# Altium footprint library AudioMoth 1.1.PCBLIB: 193 footprints (part 12 of 13)
Each footprint in its own frame and in the unit in brackets; x right, y up, seen from the top. Pads: shape width x height; smd on the part's side, far side on the other; paste and mask are expansions set on the pad; w line width, h text height; cw(c..) or ccw(c..) is an arc to the next point about the centre after c.
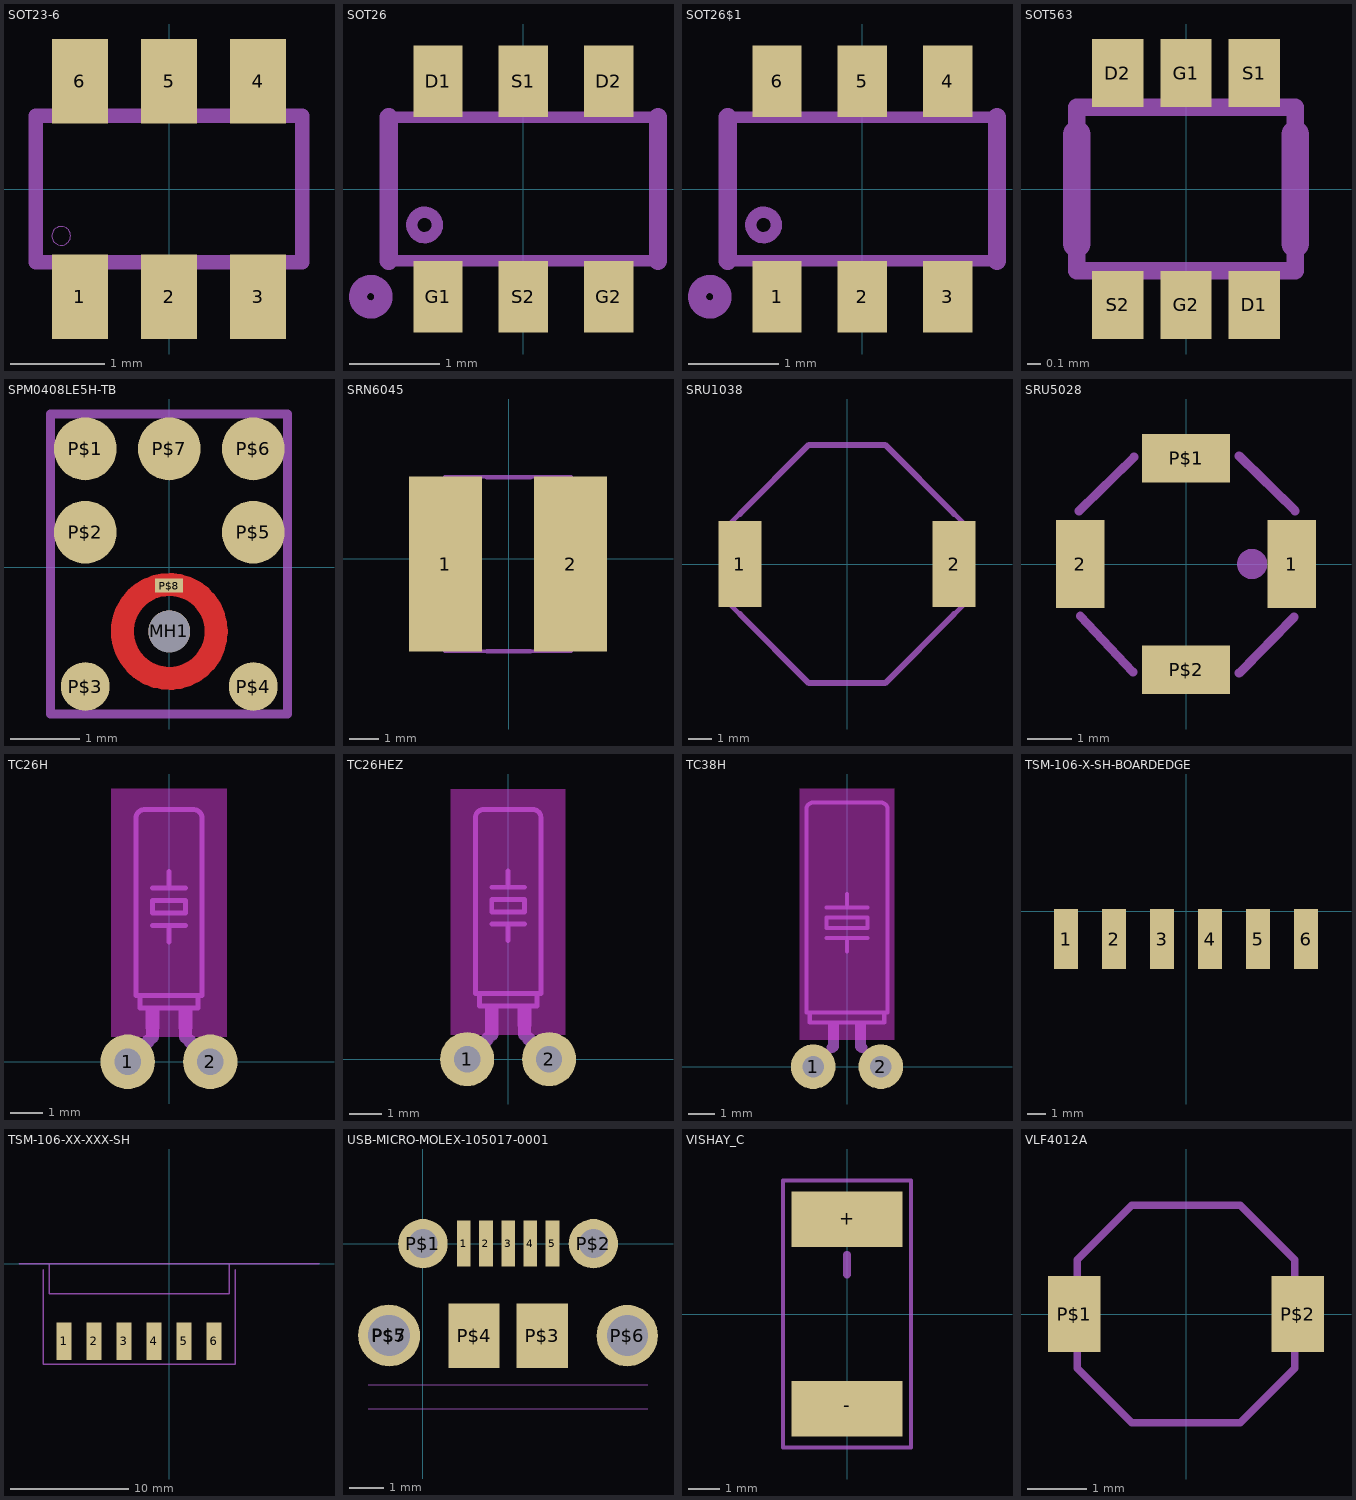
[diagram p11: the footprints below, top view; thin cyan lines are the x and y axes]

## SOT23-6 [mm]
pads (6):
  rect 0.6x0.9 smd: 1(-0.95,-1.15) 2(0,-1.15) 3(0.95,-1.15) 4(0.95,1.15) 5(0,1.15) 6(-0.95,1.15)
tDocu:
  region: -1.2,-1.4 -1.2,-0.8 -0.7,-0.8 -0.7,-1.4
  region: -0.25,-1.4 -0.25,-0.8 0.25,-0.8 0.25,-1.4
  region: 0.7,-1.4 0.7,-0.8 1.2,-0.8 1.2,-1.4
  region: 0.7,0.8 0.7,1.4 1.2,1.4 1.2,0.8
  region: -0.25,0.8 -0.25,1.4 0.25,1.4 0.25,0.8
  region: -1.2,0.8 -1.2,1.4 -0.7,1.4 -0.7,0.8
  lines w0.152: -1.423,-0.781 1.422,-0.781 ; -1.423,0.781 1.422,0.781
tPlace:
  circle w0: c-1.15,-0.5 r0.1
  lines w0.152: -1.423,-0.781 -1.423,0.781 ; 1.422,-0.781 1.422,0.781

## SOT26 [mil]
pads (6):
  rect 21.65x31.5 smd: D1(-37.4,47.24) D2(37.4,47.24) G1(-37.4,-47.24) G2(37.4,-47.24) S1(0,47.24) S2(0,-47.24)
tDocu:
  circle w5: c-43.31,-15.75 r5.57
  lines w5: -59.06,-31.5 -59.06,31.5 59.06,31.5 59.06,-31.5 -59.06,-31.5
tPlace:
  circle w8: c-66.93,-47.24 r5.57
  lines w8: -59.06,-31.5 -59.06,31.5 ; 59.06,-31.5 59.06,31.5

## SOT26$1 [mil]
pads (6):
  rect 21.65x31.5 smd: 1(-37.4,-47.24) 2(0,-47.24) 3(37.4,-47.24) 4(37.4,47.24) 5(0,47.24) 6(-37.4,47.24)
tDocu:
  circle w5: c-43.31,-15.75 r5.57
  lines w5: -59.06,-31.5 -59.06,31.5 59.06,31.5 59.06,-31.5 -59.06,-31.5
tPlace:
  circle w8: c-66.93,-47.24 r5.57
  lines w8: -59.06,-31.5 -59.06,31.5 ; 59.06,-31.5 59.06,31.5

## SOT563 [mm]
pads (6):
  rect 0.375x0.5 smd: D1(0.5,-0.85) D2(-0.5,0.85) G1(0,0.85) G2(0,-0.85) S1(0.5,0.85) S2(-0.5,-0.85)
tDocu:
  lines w0.127: -0.8,-0.6 0.8,-0.6 0.8,0.6 -0.8,0.6 -0.8,-0.6
tPlace:
  lines w0.203: -0.8,-0.4 -0.8,0.4 ; 0.8,-0.4 0.8,0.4

## SPM0408LE5H-TB [mil]
pads (9):
  round 23.62 hole 23.62 unplated: MH1(0.16,-36.06)
  rrect100% 35.43x35.43 smd: P$1(-47.24,66.93) P$2(-47.24,19.92) P$5(47.56,19.92) P$6(47.56,66.93) P$7(0.16,66.93)
  rrect100% 27.56x27.56 smd: P$3(-47.24,-67.17) P$4(47.56,-67.17)
  rrect3% 16x8 smd: P$8(0,-10.24)
Top:
  circle w12.99: c0.16,-36.06 r26.5
Top Paste:
  circle w12.99: c0.16,-36.06 r26.5
Top Solder:
  circle w13.78: c0.16,-36.06 r27.56
tPlace:
  lines w5: -66.93,-82.68 66.93,-82.68 66.93,86.61 -66.93,86.61 -66.93,-82.68

## SRN6045 [mm]
pads (2):
  rect 2.5x6 smd: 1(-2.175,-0.175) 2(2.125,-0.175)
tDocu:
  lines w0.127: -3.175,-2.175 -2.175,-3.175 2.125,-3.175 3.125,-2.175 3.125,1.825 2.125,2.825 -2.175,2.825 -3.175,1.825 -3.175,-2.175
tPlace:
  lines w0.152: -0.762,-3.175 0.762,-3.175 ; -0.762,2.794 0.762,2.794

## SRU1038 [mm]
pads (2):
  rect 1.8x3.6 smd: 1(-4.5,0) 2(4.5,0)
tDocu:
  lines w0.203: -5,-1.6 -5,1.6 -1.6,5 1.6,5 5,1.6 5,-1.6 1.6,-5 -1.6,-5 -5,-1.6
tPlace:
  lines w0.254: -4.5,-2.1 -1.6,-5 1.6,-5 4.5,-2.1 ; -4.5,2.1 -1.6,5 1.6,5 4.5,2.1

## SRU5028 [mm]
pads (4):
  rect 1.1x2 smd: 1(2.4,0) 2(-2.4,0)
  rect 2x1.1 smd: P$1(0,2.4) P$2(0,-2.4)
tDocu:
  lines w0.203: -2.6,-0.9 -2.6,0.9 ; -0.9,-2.6 0.9,-2.6 ; -0.9,2.6 0.9,2.6 ; 2.6,-0.9 2.6,0.9
tPlace:
  circle w0.4: c1.5,0 r0.141
  lines w0.203: -2.422,1.205 -1.179,2.422 ; -2.397,-1.179 -1.205,-2.448 ; 1.205,-2.473 2.448,-1.205 ; 1.205,2.448 2.473,1.205

## TC26H [mil]
pads (2):
  round 66 hole 32: 1(-50,0) 2(50,0)
Top keep-out:
  region: -70,30 -70,330 70,330 70,30
tDocu:
  lines w16: -50,0 -25,25 ; 25,25 50,0
tPlace:
  region: 12,40 12,63 28,63 28,40
  region: -28,40 -28,63 -12,63 -12,40
  lines w6: -20,165 0,165 ; -20,210 0,210 ; 0,145 0,165 ; 0,230 0,210 ; 20,165 0,165 ; 20,210 0,210 ; -35,80 -35,65 35,65 35,80 ; -35,80 -40,80 -40,295 cw(c-30,295) -30,305 30,305 cw(c30,295) 40,295 40,80 35,80 ; -35,80 35,80 ; -20,180 -20,195 20,195 20,180 -20,180
  lines w16: -20,30 -20,50 ; 20,30 20,45

## TC26HEZ [mil]
pads (2):
  round 66 hole 32: 1(-50,0) 2(50,0)
Top keep-out:
  region: -70,30 -70,330 70,330 70,30
Top Solder:
  circle w0: c-50,0 r20
  circle w0: c50,0 r20
Bottom Solder:
  circle w0: c-50,0 r36.4
  circle w0: c50,0 r36.06
tDocu:
  lines w16: -50,0 -25,25 ; 25,25 50,0
tPlace:
  region: 12,40 12,63 28,63 28,40
  region: -28,40 -28,63 -12,63 -12,40
  lines w6: -20,165 0,165 ; -20,210 0,210 ; 0,145 0,165 ; 0,230 0,210 ; 20,165 0,165 ; 20,210 0,210 ; -35,80 -35,65 35,65 35,80 ; -35,80 -40,80 -40,295 cw(c-30,295) -30,305 30,305 cw(c30,295) 40,295 40,80 35,80 ; -35,80 35,80 ; -20,180 -20,195 20,195 20,180 -20,180
  lines w16: -20,30 -20,50 ; 20,30 20,45

## TC38H [mil]
pads (2):
  round 66 hole 32: 1(-50,0) 2(50,0)
Top keep-out:
  region: -70,40 -70,410 70,410 70,40
tDocu:
  lines w6: -50,0 -25,25 ; 25,25 50,0
tPlace:
  region: 12,40 12,63 28,63 28,40
  region: -28,40 -28,63 -12,63 -12,40
  lines w6: -30,190 0,190 ; -30,235 0,235 ; 0,170 0,190 ; 0,255 0,235 ; 30,190 0,190 ; 30,235 0,235 ; -55,80 -55,65 55,65 55,80 ; -55,80 -60,80 -60,380 cw(c-50,380) -50,390 50,390 cw(c50,380) 60,380 60,80 55,80 ; -55,80 55,80 ; -30,205 -30,220 30,220 30,205 -30,205
  lines w16: -22,28 -20,30 -20,40 ; 20,45 20,30 22,28

## TSM-106-X-SH-BOARDEDGE [mil]
pads (6):
  rect 50x125 smd: 1(-250,-58) 2(-150,-58) 3(-50,-58) 4(50,-58) 5(150,-58) 6(250,-58)

## TSM-106-XX-XXX-SH [mil]
pads (6):
  rect 50x125 smd: 1(-350,-258) 2(-250,-258) 3(-150,-258) 4(-50,-258) 5(50,-258) 6(150,-258)
tDocu:
  lines w5: -400,-100 200,-100 200,0 -400,0 -400,-100
tPlace:
  lines w5: -420,-20 -420,-335.5 220,-335.5 220,-20
  text "1" at -467,-274 h77.5
Measures:
  lines w5: -500,0 500,0

## USB-MICRO-MOLEX-105017-0001 [mm]
pads (12):
  rect 0.4x1.35 smd: 1(1.2,0) 2(1.85,0) 3(2.5,0) 4(3.15,0) 5(3.8,0)
  round 1.45 hole 0.85: P$1(0,0) P$2(5,0)
  rect 1.5x1.9 smd: P$3(3.5,-2.7) P$4(1.5,-2.7)
  round 1.8 hole 1.2: P$5(-1.006,-2.685) P$6(5.997,-2.697) P$7(-0.983,-2.697)
Reference:
  lines w0: -1.6,-4.85 6.6,-4.85 ; -1.6,-4.15 6.6,-4.15
  text "PCB EDGE" at 1.55,-4.15 h0.46
  text "CONNECTOR FRONT INTERFACE" at -0.8,-4.85 h0.46

## VISHAY_C [mil]
pads (2):
  rect 140x70 smd: +(0,120) -(0,-120)
tPlace:
  lines w5: -81,-169 -81,169 81,169 81,-169 -81,-169
  lines w10: 0,50 0,75

## VLF4012A [mm]
pads (2):
  rect 0.9x1.3 smd: P$1(-1.9,0) P$2(1.9,0)
tPlace:
  lines w0.127: -1.85,-0.925 -0.925,-1.85 0.925,-1.85 1.85,-0.925 1.85,0.925 0.925,1.85 -0.925,1.85 -1.85,0.925 -1.85,-0.925